# EAGLE library part MIC39101-5.0YM-TR (library MIC39101-5.0YM-TR)
LDO Voltage Regulators 1.0A 1.0% Fixed Voltage LDO Source: Datasheet <http://www.microchip.com/mymicrochip/filehandler.aspx?ddocname=en581613>
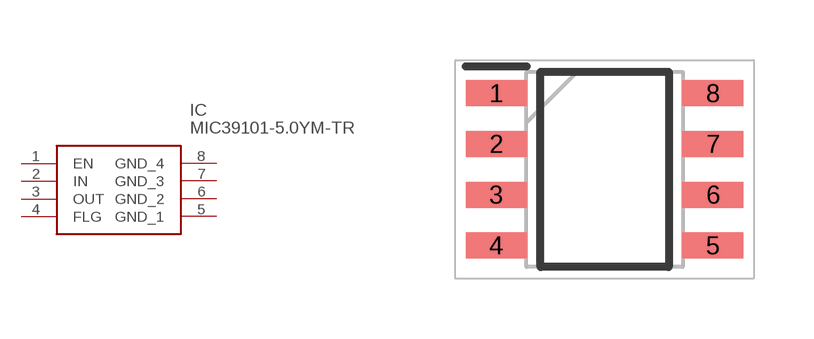
[diagram p0: symbol with the pads of SOIC127P599X173-8N; footprint SOIC127P599X173-8N]

Designator prefix IC

## MIC39101-5.0YM-TR (Description: LDO Voltage Regulators 1.0A 1.0% Fixed Voltage LDO; Height: 1.73mm; Manufacturer_Name: Microchip; Manufacturer_Part_Number: MIC39101-5.0YM-TR; Mouser_Part_Number: 998-MIC39101-5.0YMTR; Mouser_Price-Stock: https://www.mouser.co.uk/ProductDetail/Microchip-Technology-Micrel/MIC39101-50YM-TR?qs=U6T8BxXiZAW4%252Bcnkgk10yA%3D%3D)  [SOIC127P599X173-8N]
1  EN
2  IN
3  OUT
4  FLG
5  GND_1
6  GND_2
7  GND_3
8  GND_4

## Footprint SOIC127P599X173-8N (pad centres in mm)
MIC39101-5.0YM-TR
smd 1.525 x 0.65: 1 -2.712,1.905; 2 -2.712,0.635; 3 -2.712,-0.635; 4 -2.712,-1.905; 5 2.712,-1.905; 6 2.712,-0.635; 7 2.712,0.635; 8 2.712,1.905